# Altium footprint library 7seg.PcbLib: 32 footprints (part 1 of 2)
Each footprint in its own frame and in the unit in brackets; x right, y up, seen from the top. Pads: shape width x height; smd on the part's side, far side on the other; paste and mask are expansions set on the pad; w line width, h text height; cw(c..) or ccw(c..) is an arc to the next point about the centre after c.
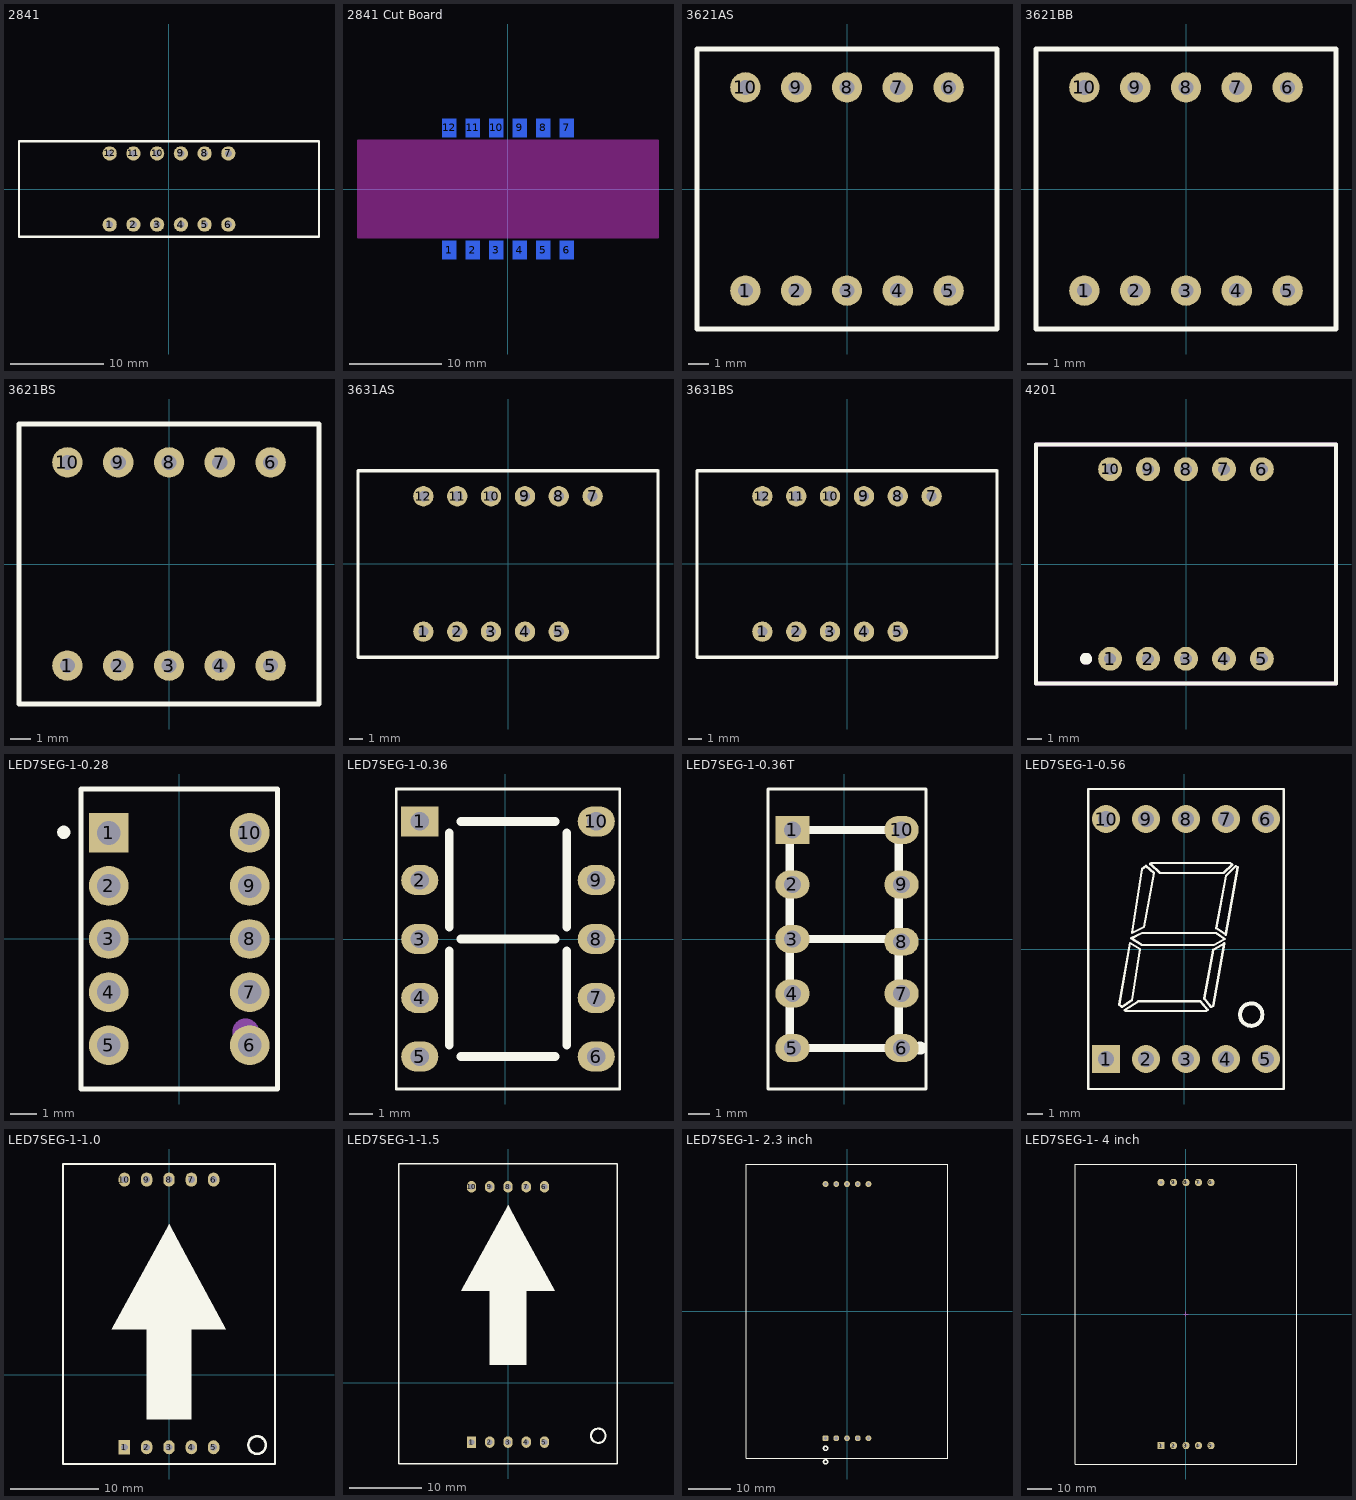
[diagram p0: the footprints below, top view; thin cyan lines are the x and y axes]

## 2841 [mil] "32 x10 x 5.8mm"
pads (12):
  round 60 hole 30: 1(-250,-150) 2(-150,-150) 3(-50,-150) 4(50,-150) 5(150,-150) 6(250,-150) 7(250,150) 8(150,150) 9(50,150) 10(-50,150) 11(-150,150) 12(-250,150)
Top Overlay:
  lines w10: -631.89,-200.79 -631.89,200.79 631.89,200.79 631.89,-200.79 -631.89,-200.79
Top Designator:
  text ".Designator" at -146.08,-13.54 h60
3D body "User Library-7seg4digit_028.SLDPRT": height 236.22, standoff -216.54, extent -629.92,-198.82 629.92,198.82

## 2841 Cut Board [mm] "32 x10 x 5.8mm"
pads (12):
  rect 1.5x2 smd far side: 1(-6.35,-6.631) 2(-3.81,-6.631) 3(-1.27,-6.631) 4(1.27,-6.631) 5(3.81,-6.631) 6(6.35,-6.631) 7(6.35,6.631) 8(3.81,6.631) 9(1.27,6.631) 10(-1.27,6.631) 11(-3.81,6.631) 12(-6.35,6.631)
Keep-Out Layer:
  board cut-out: -16.25,-5.25 -16.25,5.25 16.25,5.25 16.25,-5.25
Keep-Out Layer:
  lines w0.254: -16.25,-5.25 16.25,-5.25 16.25,5.25 -16.25,5.25 -16.25,-5.25
Top Designator:
  text ".Designator" at -3.71,-0.344 h1.52
3D body "User Library-7seg4digit_028.SLDPRT": height 0, standoff -11.5, extent -16,-5.05 16,5.05

## 3621AS [mil] "15 x 14 x 7.2mm"
pads (10):
  round 60 hole 30: 1(-200,-200) 2(-100,-200) 3(0,-200) 4(100,-200) 5(200,-200) 6(200,200) 7(100,200) 8(0,200) 9(-100,200) 10(-200,200)
Top Overlay:
  lines w10: -295.28,-275.59 295.28,-275.59 295.28,275.59 -295.28,275.59 -295.28,-275.59
Top Designator:
  text ".Designator" at -146.08,-13.54 h60
3D body "7 Segment Double Digit LED Display.STEP": height 315.75, standoff -118.11, extent -295.28,-275.79 295.27,275.78

## 3621BB [mil] "15 x 14 x 7.2mm"
pads (10):
  round 60 hole 30: 1(-200,-200) 2(-100,-200) 3(0,-200) 4(100,-200) 5(200,-200) 6(200,200) 7(100,200) 8(0,200) 9(-100,200) 10(-200,200)
Top Overlay:
  lines w10: -295.28,-275.59 -295.28,275.59 295.28,275.59 295.28,-275.59 -295.28,-275.59
Top Designator:
  text ".Designator" at -146.08,-13.54 h60
3D body "7 Segment Double Digit LED Display.STEP": height 315.75, standoff -118.11, extent -295.28,-275.79 295.27,275.78

## 3621BS [mil] "15 x 14 x 7.2mm"
pads (10):
  round 60 hole 30: 1(-200,-200) 2(-100,-200) 3(0,-200) 4(100,-200) 5(200,-200) 6(200,200) 7(100,200) 8(0,200) 9(-100,200) 10(-200,200)
Top Overlay:
  lines w10: -295.28,-275.59 295.28,-275.59 295.28,275.59 -295.28,275.59 -295.28,-275.59
Top Designator:
  text ".Designator" at -146.08,-13.54 h60
3D body "7 Segment Double Digit LED Display.STEP": height 315.75, standoff -118.11, extent -295.28,-275.79 295.27,275.78

## 3631AS [mil] "Size: 22.5 x 14 x 7.2mm"
pads (11):
  round 60 hole 30: 1(-250,-200) 2(-150,-200) 3(-50,-200) 4(50,-200) 5(150,-200) 7(250,200) 8(150,200) 9(50,200) 10(-50,200) 11(-150,200) 12(-250,200)
Top Overlay:
  lines w10: -443,-276 443,-276 443,275.48 442.89,275.59 -442.91,275.59 -442.91,-275.91 -443,-276
Top Designator:
  text ".Designator" at -146.08,-13.75 h60
3D body "SD-3361_X.SLDPRT": height 472.44, standoff -51.18, extent -442.91,-275.59 442.92,275.59

## 3631BS [mil] "Size: 22.5 x 14 x 7.2mm"
pads (11):
  round 60 hole 30: 1(-250,-200) 2(-150,-200) 3(-50,-200) 4(50,-200) 5(150,-200) 7(250,200) 8(150,200) 9(50,200) 10(-50,200) 11(-150,200) 12(-250,200)
Top Overlay:
  lines w10: -443,-276 -442.91,-275.91 -442.91,275.59 442.89,275.59 443,275.48 443,-276 -443,-276
Top Designator:
  text ".Designator" at -146.08,-13.75 h60
3D body "SD-3361_X.SLDPRT": height 472.44, standoff -51.18, extent -442.91,-275.59 442.92,275.59

## 4201 [mm] "size 20.1x16.0x7.0mm"
pads (10):
  round 1.6 hole 0.8: 1(-5.08,-6.35) 2(-2.54,-6.35) 3(0,-6.35) 4(2.54,-6.35) 5(5.08,-6.35) 6(5.08,6.35) 7(2.54,6.35) 8(0,6.35) 9(-2.54,6.35) 10(-5.08,6.35)
Top Overlay:
  circle w0.4: c-6.7,-6.35 r0.2
  lines w0.254: -10.05,-8 -10.05,8 10.05,8 10.05,-8 -10.05,-8
Top Designator:
  circle w0.4: c-6.7,-6.35 r0.2
  lines w0.254: -10.05,-8 -10.05,8 10.05,8 10.05,-8 -10.05,-8
  text ".Designator" at -4.874,-0.452 h2

## LED7SEG-1-0.28 [mm]
height 7.62
pads (10):
  rect 1.5x1.5 hole 0.9: 1(-2.655,4)
  round 1.5 hole 0.9: 2(-2.655,2) 3(-2.655,0) 4(-2.655,-2) 5(-2.655,-4) 6(2.655,-4) 7(2.655,-2) 8(2.655,0) 9(2.655,2) 10(2.655,4)
Top Overlay:
  circle w0.25: c-4.35,4.02 r0.125
  lines w0.2: -3.7,-5.65 3.7,-5.65 3.7,5.65 -0.635,5.65 -3.7,5.65 -3.7,-5.65
Mechanical 1:
  circle w0.75: c2.5,-3.5 r0.13
Top Designator:
  text ".Designator" at -4.06,-0.344 h1.52
3D body "7 segment display 7mm grn.stp": height 8.04, standoff -0.96, extent -3.9,-5.05 3.9,5.05

## LED7SEG-1-0.36 [mil]
height 300
pads (10):
  rect 62.99x51.18 hole 31: 1(-145,200)
  oval 62.99x51.18 hole 31: 2(-145,100) 3(-145,0) 4(-145,-100) 5(-145,-200) 6(155,-200) 7(155,-100) 8(155,0) 9(155,100) 10(155,200)
Top Overlay:
  circle w12: c144,-200 r6
  lines w5: -185,-255 -185,255 195,255 195,-255 -185,-255
  lines w15: -95,-180 -95,-20 ; -95,-180 -95,-20 ; -95,-180 -95,-20 ; -95,-180 -95,-20 ; -95,-180 -95,-20 ; -95,-180 -95,-20 ; -95,-180 -95,-20 ; -95,-180 -95,-20 ; -95,20 -95,180 ; -95,20 -95,180 ; -95,20 -95,180 ; -95,20 -95,180 ; -95,20 -95,180 ; -95,20 -95,180 ; -95,20 -95,180 ; -95,20 -95,180 ; -75,-200 85,-200 ; -75,-200 85,-200 ; -75,-200 85,-200 ; -75,-200 85,-200 ; -75,0 85,0 ; -75,0 85,0 ; -75,0 85,0 ; -75,0 85,0 ; -75,0 85,0 ; -75,0 85,0 ; -75,0 85,0 ; -75,0 85,0 ; -75,200 85,200 ; -75,200 85,200 ; -75,200 85,200 ; -75,200 85,200 ; 105,-180 105,-20 ; 105,-180 105,-20 ; 105,-180 105,-20 ; 105,-180 105,-20 ; 105,-180 105,-20 ; 105,-180 105,-20 ; 105,-180 105,-20 ; 105,-180 105,-20 ; 105,20 105,180 ; 105,20 105,180 ; 105,20 105,180 ; 105,20 105,180 ; 105,20 105,180 ; 105,20 105,180 ; 105,20 105,180 ; 105,20 105,180
Top Designator:
  text ".Designator" at -141.08,-13.54 h60
3D body "27755.stp": height 275.59, standoff -118.11, extent -183.97,-255.9 193.98,255.91

## LED7SEG-1-0.36T [mil] "LED, 7-Segment Display, 7.62 mm, RHD; 10 Leads; Row Space 5.08 mm; Pitch 2.54 mm"
height 300
pads (10):
  rect 62.99x51.18 hole 31: 1(-95,200)
  oval 62.99x51.18 hole 31: 2(-95,100) 3(-95,0) 4(-95,-100) 5(-95,-200) 6(105,-200) 7(105,-100) 8(105,-5) 9(105,100) 10(105,200)
Top Overlay:
  circle w12: c139,-200 r6
  lines w5: -140,-275 -140,275 150,275 150,-275 -140,-275
  lines w15: -100,-180 -100,-20 ; -100,-180 -100,-20 ; -100,-180 -100,-20 ; -100,-180 -100,-20 ; -100,-180 -100,-20 ; -100,-180 -100,-20 ; -100,-180 -100,-20 ; -100,-180 -100,-20 ; -100,20 -100,180 ; -100,20 -100,180 ; -100,20 -100,180 ; -100,20 -100,180 ; -100,20 -100,180 ; -100,20 -100,180 ; -100,20 -100,180 ; -100,20 -100,180 ; -80,-200 80,-200 ; -80,-200 80,-200 ; -80,-200 80,-200 ; -80,-200 80,-200 ; -80,0 80,0 ; -80,0 80,0 ; -80,0 80,0 ; -80,0 80,0 ; -80,0 80,0 ; -80,0 80,0 ; -80,0 80,0 ; -80,0 80,0 ; -80,200 80,200 ; -80,200 80,200 ; -80,200 80,200 ; -80,200 80,200 ; 100,-180 100,-20 ; 100,-180 100,-20 ; 100,-180 100,-20 ; 100,-180 100,-20 ; 100,-180 100,-20 ; 100,-180 100,-20 ; 100,-180 100,-20 ; 100,-180 100,-20 ; 100,20 100,180 ; 100,20 100,180 ; 100,20 100,180 ; 100,20 100,180 ; 100,20 100,180 ; 100,20 100,180 ; 100,20 100,180 ; 100,20 100,180
Top Designator:
  text ".Designator" at -141.08,-13.54 h60
3D body "SW3dPS-Disp_SA36-11.STEP": height 156.19, standoff -335.93, extent -142.64,-275.59 152.63,275.59

## LED7SEG-1-0.56 [mil]
pads (10):
  rect 70x70 hole 40: 1(-195,-275)
  round 70 hole 40: 2(-95,-275) 3(5,-275) 4(105,-275) 5(205,-275) 6(205,325) 7(105,325) 8(5,325) 9(-95,325) 10(-195,325)
Top Overlay:
  circle w10: c168,-164 r28.02
  lines w6: -140,-155 -119,-155 ; -116,-155 -143,-155 -145,-155 ; -74,215 102,215 115,215 121,211 99,190 78,190 ; -72,215 -82,215 -85,213 -84,212 -60,190 80,190 ; -155,-145 -130,-128 ; -155,-145 -162,-139 -135,15 -110,0 -130,-128 ; -155,-145 -130,-128 ; -145,-155 -148,-153 -114,-131 41,-131 59,-152 55,-155 -95,-155 -145,-155 ; -239,-350 -239,400 249,400 249,-350 -239,-350 ; -132,27 -105,10 75,10 102,25 80,40 -105,40 -132,27 ; -130,40 -105,200 -95,208 -75,190 -100,55 -130,40 ; 51,-124 68,-145 73,-142 101,14 77,0 73,-2 51,-124 ; 81,52 104,36 134,205 129,207 105,183 81,52
Top Designator:
  text ".Designator" at -141.08,11.46 h60
3D body "27763.stp": height 314.96, standoff -137.8, extent -241.06,-349.01 251.07,399.02

## LED7SEG-1-1.0 [mm]
height 7.62
pads (10):
  rect 1.3x1.6 hole 0.787: 1(-5.08,-8.255)
  oval 1.3x1.6 hole 0.787: 2(-2.54,-8.255) 3(0,-8.255) 4(2.54,-8.255) 5(5.08,-8.255) 6(5.08,22.225) 7(2.54,22.225) 8(0,22.225) 9(-2.54,22.225) 10(-5.08,22.225)
Top Overlay:
  circle w0.305: c10.033,-8.001 r1
  region: -6.502,5.182 0,17.145 1.905,13.589 6.477,5.182 2.54,5.182 2.54,-5.08 -2.54,-5.08 -2.54,5.182
  lines w0.2: -12.065,-10.16 -12.065,24.003 12.065,24.003 12.065,-10.16 -12.065,-10.16
Top Designator:
  text ".Designator" at -3.71,6.578 h1.52
3D body "7seg1inch.SLDPRT": height 10.5, standoff -3, extent -12,-10.033 12,23.967

## LED7SEG-1-1.5 [mm]
height 7.62
pads (10):
  rect 1.3x1.6 hole 0.787: 1(-5.08,-8.255)
  oval 1.3x1.6 hole 0.787: 2(-2.54,-8.255) 3(0,-8.255) 4(2.54,-8.255) 5(5.08,-8.255) 6(5.08,27.305) 7(2.54,27.305) 8(0,27.305) 9(-2.54,27.305) 10(-5.08,27.305)
Top Overlay:
  circle w0.305: c12.573,-7.366 r1
  region: -6.502,12.802 0,24.765 1.905,21.209 6.477,12.802 2.54,12.802 2.54,2.54 -2.54,2.54 -2.54,12.802
  lines w0.178: 8.255,-11.303 15.24,-11.303 15.24,-8.255 15.24,30.48 0,30.48 -15.24,30.48 -15.24,-7.874 -15.24,-11.303 2.54,-11.303 9.525,-11.303
Top Designator:
  text ".Designator" at -3.71,9.245 h1.52

## LED7SEG-1- 2.3 inch [mm]
pads (10):
  rrect50% 1.4x1.4 / inner rrect50% 1.4x1.4 / far side rrect50% 1.4x2.2 hole 0.8 mask+0.1: 1(-5.08,-30.1)
  round 1.4 / inner round 1.4 / far side oval 1.4x2.2 hole 0.8 mask+0.1: 2(-2.54,-30.1) 3(0,-30.1) 4(2.54,-30.1) 5(5.08,-30.1) 6(5.08,30.1) 7(2.54,30.1) 8(0,30.1) 9(-2.54,30.1) 10(-5.08,30.1)
Top Overlay:
  circle w0.3: c-5.08,-32.5 r0.5
  circle w0.3: c-5.08,-35.7 r0.5
  lines w0.2: -23.9,-34.85 23.9,-34.85 23.9,34.85 -23.9,34.85 -23.9,-34.85
Top Designator:
  text ".Designator" at -3.71,-1.019 h1.52
3D body "User Library-King Bright SA23-11.step": height 12.01, standoff -3.99, extent -24,-35 24,35

## LED7SEG-1- 4 inch [mm]
pads (10):
  rect 3x3 hole 1.2: 1(-10.16,-53.5)
  round 3 hole 1.2: 2(-5.08,-53.5) 3(0,-53.5) 4(5.08,-53.5) 5(10.16,-53.5) 6(10.16,53.5) 7(5.08,53.5) 8(0,53.5) 9(-5.08,53.5) 10(-10.16,53.5)
Top Overlay:
  lines w0.152: -45,-61 45,-61 45,61 -45,61 -45,-61
Top Designator:
  text ".Designator" at -3.71,-0.344 h1.52
Mechanical 15:
  lines w0.2: -1,0 1,0 ; 0,-1 0,1
3D body "User Library-Disp_SA40-18.STEP": height 15.01, standoff -6.99, extent -45,-61 45,61